# Altium schematic symbol library PiggySat.SchLib: 12 symbols
Pins are listed as number, name and electrical type; pins without a type are passive.

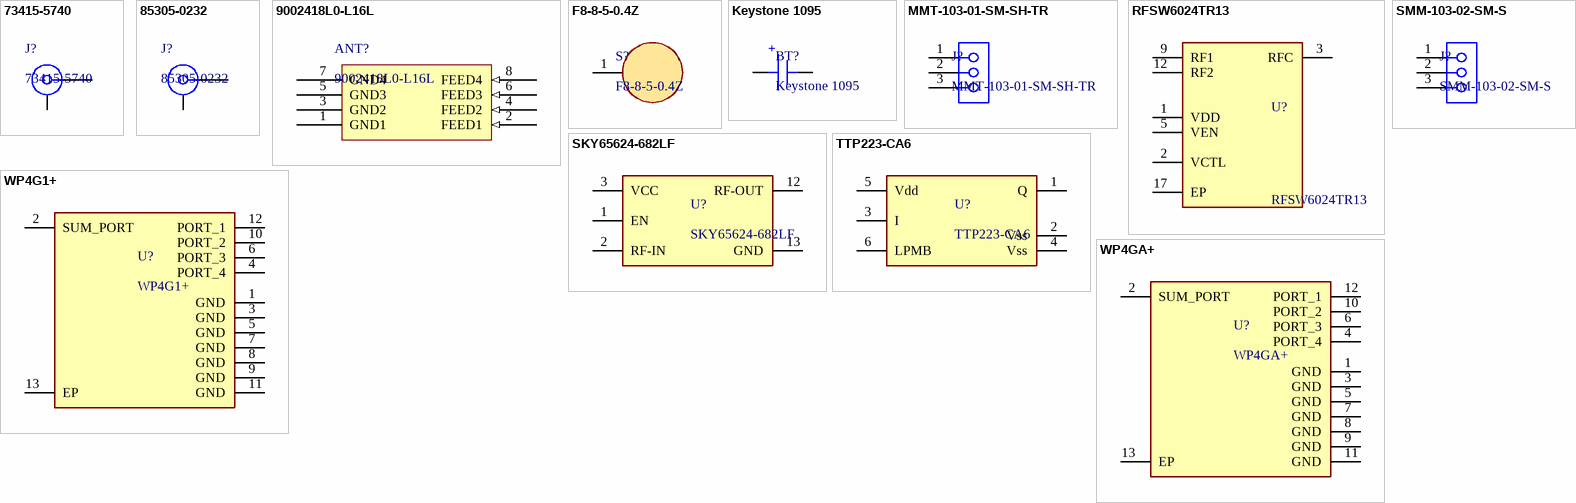
[diagram p0: symbols 73415-5740 to WP4GA+]

## 73415-5740
designator J?
SMP PLUG, PCB EDGE MNT, SMOOTH B; Manufacturer: MOLEX; ComponentLink5Description: Webshop / RFQ; ComponentLink5URL: http://www.rosenberger.com/en/contact/sales/; ComponentLink3URL: http://rosenberger.de/ok/images/documents/db/32K145-400L5.pdf; ComponentLink2URL: http://rosenberger.de/ok/images/documents/db/32K145-400L5.pdf; ComponentLink4Description: Series Overview / Design Note; ComponentLink1Description: Manufacturer URL; ComponentLink2Description: Datasheet; ComponentLink3Description: Package Specification; ComponentLink1URL: http://www.rosenberger.de; ComponentLink4URL: http://rosenberger.de/ok/images/documents/spez/32.pdf; Mounting Technology: Surface Mount
footprint MOLEX_734155740 (SMP PLUG, PCB EDGE MNT, SMOOTH B)
pins: 1, 2

## 85305-0232
designator J?
Circular Connector, SMP STRAIGHT PLUG, PCB, 85305 SMP RF Connectors Series; Manufacturer: MOLEX; ComponentLink5Description: Webshop / RFQ; ComponentLink5URL: http://www.rosenberger.com/en/contact/sales/; ComponentLink3URL: http://rosenberger.de/ok/images/documents/db/32K145-400L5.pdf; ComponentLink2URL: http://rosenberger.de/ok/images/documents/db/32K145-400L5.pdf; ComponentLink4Description: Series Overview / Design Note; ComponentLink1Description: Manufacturer URL; ComponentLink2Description: Datasheet; ComponentLink3Description: Package Specification; ComponentLink1URL: http://www.rosenberger.de; ComponentLink4URL: http://rosenberger.de/ok/images/documents/spez/32.pdf; Mounting Technology: Surface Mount
footprint MOLEX_85305-0232
pins: 1, 2

## 9002418L0-L16L
designator ANT?
Internal Antenna, L-Band, Cap/1.7/1.6Dbi Rohs Compliant: Yes |Kyocera Avx 9002418L0-L16L; Introduction Date: 2025-04-03; Lifecycle Status: Production; RoHS: Compliant; REACH SVHC: Yes
footprint 9002418L0-L16L-Footprint-1
pins: 1 GND1 (power), 2 FEED1 (in), 3 GND2 (power), 4 FEED2 (in), 5 GND3 (power), 6 FEED3 (in), 7 GND4 (power), 8 FEED4 (in)

## F8-8-5-0.4Z
designator S?
Capacitive Touch Contact Spring, Conical Ø8/Ø5 mm, 8 mm Height, Ø0.4 mm Wire, 3 mm THT Lead, Nickel-Plated Carbon Steel
footprint F8-8-5-0.4Z (Capacitive Touch Contact Spring, Conical Ø8/Ø5 mm, 8 mm Height, Ø0.4 mm Wire, 3 mm THT Lead, Nickel-Plated Carbon Steel)
pins: 1

## Keystone 1095
designator BT?
THM Holder for 18350 Battery P/N 1095
footprint KEYSTONE 1095 (THM Holder for 18350 Battery P/N 1095)
pins: N, P
text: +

## MMT-103-01-SM-SH-TR
designator J?
MMT Series 2.00 mm Horizontal Surface Mount Terminal Strip
footprint MMT-103-01-SM-SH-TR (MMT Series 2.00 mm Horizontal Surface Mount Terminal Strip)
pins: 1, 2, 3

## RFSW6024TR13
designator U?
5 - 6000 MHz Absorptive High Isolation SPDT Switch; Manufacturer_Name: Qorvo; Geometry.Height: 0.9mm; Mouser Part Number: 772-RFSW6024TR13; Mouser Price/Stock: https://www.mouser.co.uk/ProductDetail/Qorvo/RFSW6024TR13?qs=u4fy%2FsgLU9NLk9lDlNNCYg%3D%3D; Manufacturer_Part_Number: RFSW6024TR13; Datasheet Link: https://www.qorvo.com/products/d/da001155
footprint QFN65P400X400X90-17N
pins: 1 VDD, 2 VCTL, 3 RFC, 5 VEN, 9 RF1, 12 RF2, 17 EP

## SKY65624-682LF
designator U?
GPS/GLONASS/Galileo/BDS Low-Noise / Amplifier; MF: Mini-Circuits; MP: WP4G1+; SnapEDA_Link: https://www.snapeda.com/parts/WP4G1+/Mini-Circuits/view-part/?ref=snap; Package: VQFN-12 Mini-Circuits; Value: *; Check_prices: https://www.snapeda.com/parts/WP4G1+/Mini-Circuits/view-part/?ref=eda
pins: 1 EN (power), 2 RF-IN, 3 VCC (power), 12 RF-OUT, 13 GND (power)

## SMM-103-02-SM-S
designator J?
SMM Series 2.00 mm Tiger Eye™ High-Reliability Socket Strip
footprint SMM-103-02-SM-S (SMM Series 2.00 mm Tiger Eye™ High-Reliability Socket Strip)
pins: 1, 2, 3

## TTP223-CA6
designator U?
1 KEY TOUCH PAD DETECTOR IC; MF: Mini-Circuits; MP: WP4G1+; SnapEDA_Link: https://www.snapeda.com/parts/WP4G1+/Mini-Circuits/view-part/?ref=snap; Package: VQFN-12 Mini-Circuits; Value: *; Check_prices: https://www.snapeda.com/parts/WP4G1+/Mini-Circuits/view-part/?ref=eda
footprint SOT-23-6L (SOT23, 6-Leads)
pins: 1 Q, 2 Vss (power), 3 I (power), 4 Vss (power), 5 Vdd (power), 6 LPMB

## WP4G1+
designator U?
RF Power Divider 1.3 GHz ~ 2 GHz Isolation (Min) 14dB, 1.5 VSWR (Typ), 5° Imbalance (Max) 12-VQFN Exposed Pad; MF: Mini-Circuits; SnapEDA_Link: https://www.snapeda.com/parts/WP4G1+/Mini-Circuits/view-part/?ref=snap; Package: VQFN-12 Mini-Circuits; Value: *; MP: WP4G1+; Check_prices: https://www.snapeda.com/parts/WP4G1+/Mini-Circuits/view-part/?ref=eda
footprint WP4_12QFN
pins: 1 GND (power), 2 SUM_PORT, 3 GND (power), 4 PORT_4, 5 GND (power), 6 PORT_3, 7 GND (power), 8 GND (power), 9 GND (power), 10 PORT_2, 11 GND (power), 12 PORT_1, 13 EP (power)

## WP4GA+
designator U?
4 Ways MMIC Power Splitter, 1420 - 1660 MHz, 50Ω; MF: Mini-Circuits; MP: WP4G1+; SnapEDA_Link: https://www.snapeda.com/parts/WP4G1+/Mini-Circuits/view-part/?ref=snap; Package: VQFN-12 Mini-Circuits; Value: *; Check_prices: https://www.snapeda.com/parts/WP4G1+/Mini-Circuits/view-part/?ref=eda
footprint WP4_12QFN
pins: 1 GND (power), 2 SUM_PORT, 3 GND (power), 4 PORT_4, 5 GND (power), 6 PORT_3, 7 GND (power), 8 GND (power), 9 GND (power), 10 PORT_2, 11 GND (power), 12 PORT_1, 13 EP (power)